# Altium schematic symbol library CH340E.SchLib: 1 symbol
Pins are listed as number, name and electrical type; pins without a type are passive.

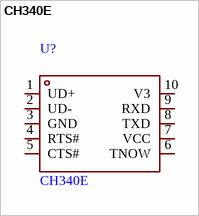
[diagram p0: symbol CH340E]

## CH340E
designator U?
USB转串口芯片CH340 / 应用功能:收发器 / USB协议版本:USB 2.0 / 数据速率:2Mbps / 型号:CH340E / LCSC C99652 / 厂牌:WCH(南京沁恒)
footprint MSOP-10_L3.0-W3.0-P0.50-LS5.0-BL (PCB footprint)
pins: 1 UD+, 2 UD-, 3 GND, 4 RTS#, 5 CTS#, 6 TNOW, 7 VCC, 8 TXD, 9 RXD, 10 V3